# Altium schematic symbol library SS36.SchLib: 1 symbol
Pins are listed as number, name and electrical type; pins without a type are passive.

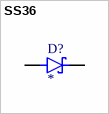
[diagram p0: symbol SS36]

## SS36
designator D?
3A, 60V, Schottky Rectifier; MF: Taiwan Semiconductor; MP: SS36; SnapEDA_Link: https://www.snapeda.com/parts/SS36/taiwan/view-part/?ref=snap; Package: DO-214AB-2 Taiwan Semiconductor; Value: *; Check_prices: https://www.snapeda.com/parts/SS36/taiwan/view-part/?ref=eda
footprint DIO_SS36
pins: A, C K